# Altium schematic symbol library AVR128DB28-ISO.SchLib: 1 symbol
Pins are listed as number, name and electrical type; pins without a type are passive.

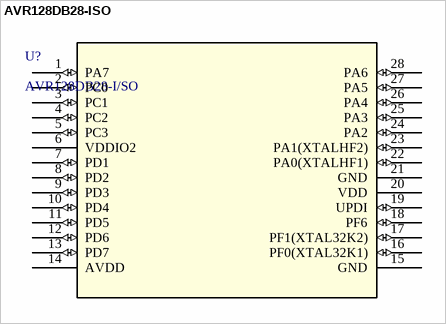
[diagram p0: symbol AVR128DB28-ISO]

## AVR128DB28-ISO
designator U?, comment AVR128DB28-I/SO
No Description Available; Manufacturer_Name: Microchip; Copyright: Copyright (C) 2026 Ultra Librarian. All rights reserved.; Manufacturer_Part_Number: AVR128DB28-I/SO; RefDes: RefDes; Type: Type
footprint SOIC28_SO_MCH
pins: 1 PA7 (io), 2 PC0 (io), 3 PC1 (io), 4 PC2 (io), 5 PC3 (io), 6 VDDIO2 (power), 7 PD1 (io), 8 PD2 (io), 9 PD3 (io), 10 PD4 (io), 11 PD5 (io), 12 PD6 (io), 13 PD7 (io), 14 AVDD (power), 15 GND (power), 16 PF0(XTAL32K1) (io), 17 PF1(XTAL32K2) (io), 18 PF6 (io), 19 UPDI (io), 20 VDD (power), 21 GND (power), 22 PA0(XTALHF1) (io), 23 PA1(XTALHF2) (io), 24 PA2 (io), 25 PA3 (io), 26 PA4 (io), 27 PA5 (io), 28 PA6 (io)